# Altium footprint library ESP32_HMI1.PcbLib: 33 footprints (part 3 of 3)
Each footprint in its own frame and in the unit in brackets; x right, y up, seen from the top. Pads: shape width x height; smd on the part's side, far side on the other; paste and mask are expansions set on the pad; w line width, h text height; cw(c..) or ccw(c..) is an arc to the next point about the centre after c.
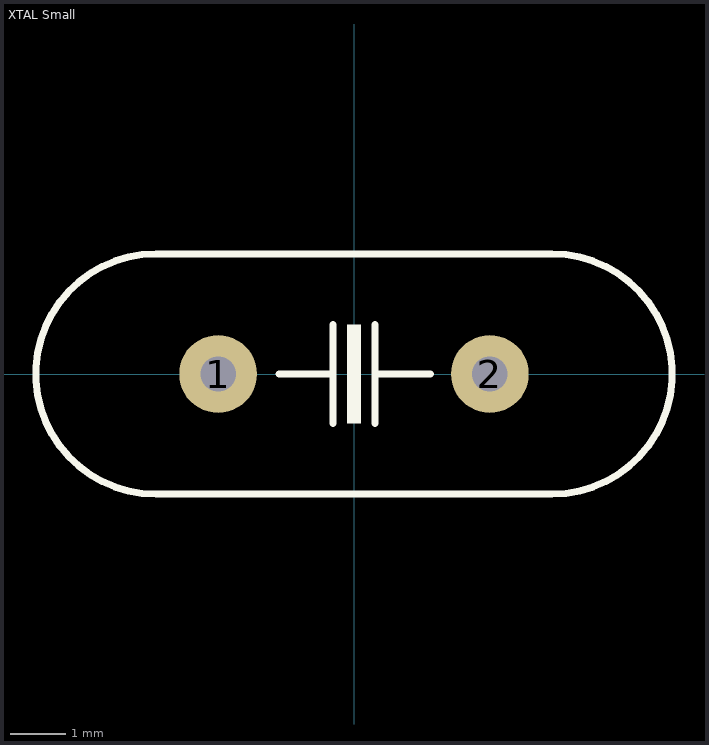
[diagram p2: the footprint, top view; thin cyan lines are the x and y axes]

## XTAL Small [mil]
pads (2):
  round 55 hole 25: 1(-96.06,0) 2(96.06,0)
Top Overlay:
  rectangle: -5,-35 5,35
  lines w5: -53,0 -15,0 ; -15,-35 -15,35 ; 15,-35 15,35 ; 15,0 54,0 ; -140,-85 cw(c-140,0) -140,85 140,85 cw(c140,0) 140,-85 -140,-85
3D body "Crystal-3.8mm.STEP": height 140.16, standoff -78.74, extent -226.38,-88.58 226.38,88.58